# Altium footprint library 固定柱.PcbLib: 140 footprints (part 5 of 9)
Each footprint in its own frame and in the unit in brackets; x right, y up, seen from the top. Pads: shape width x height; smd on the part's side, far side on the other; paste and mask are expansions set on the pad; w line width, h text height; cw(c..) or ccw(c..) is an arc to the next point about the centre after c.
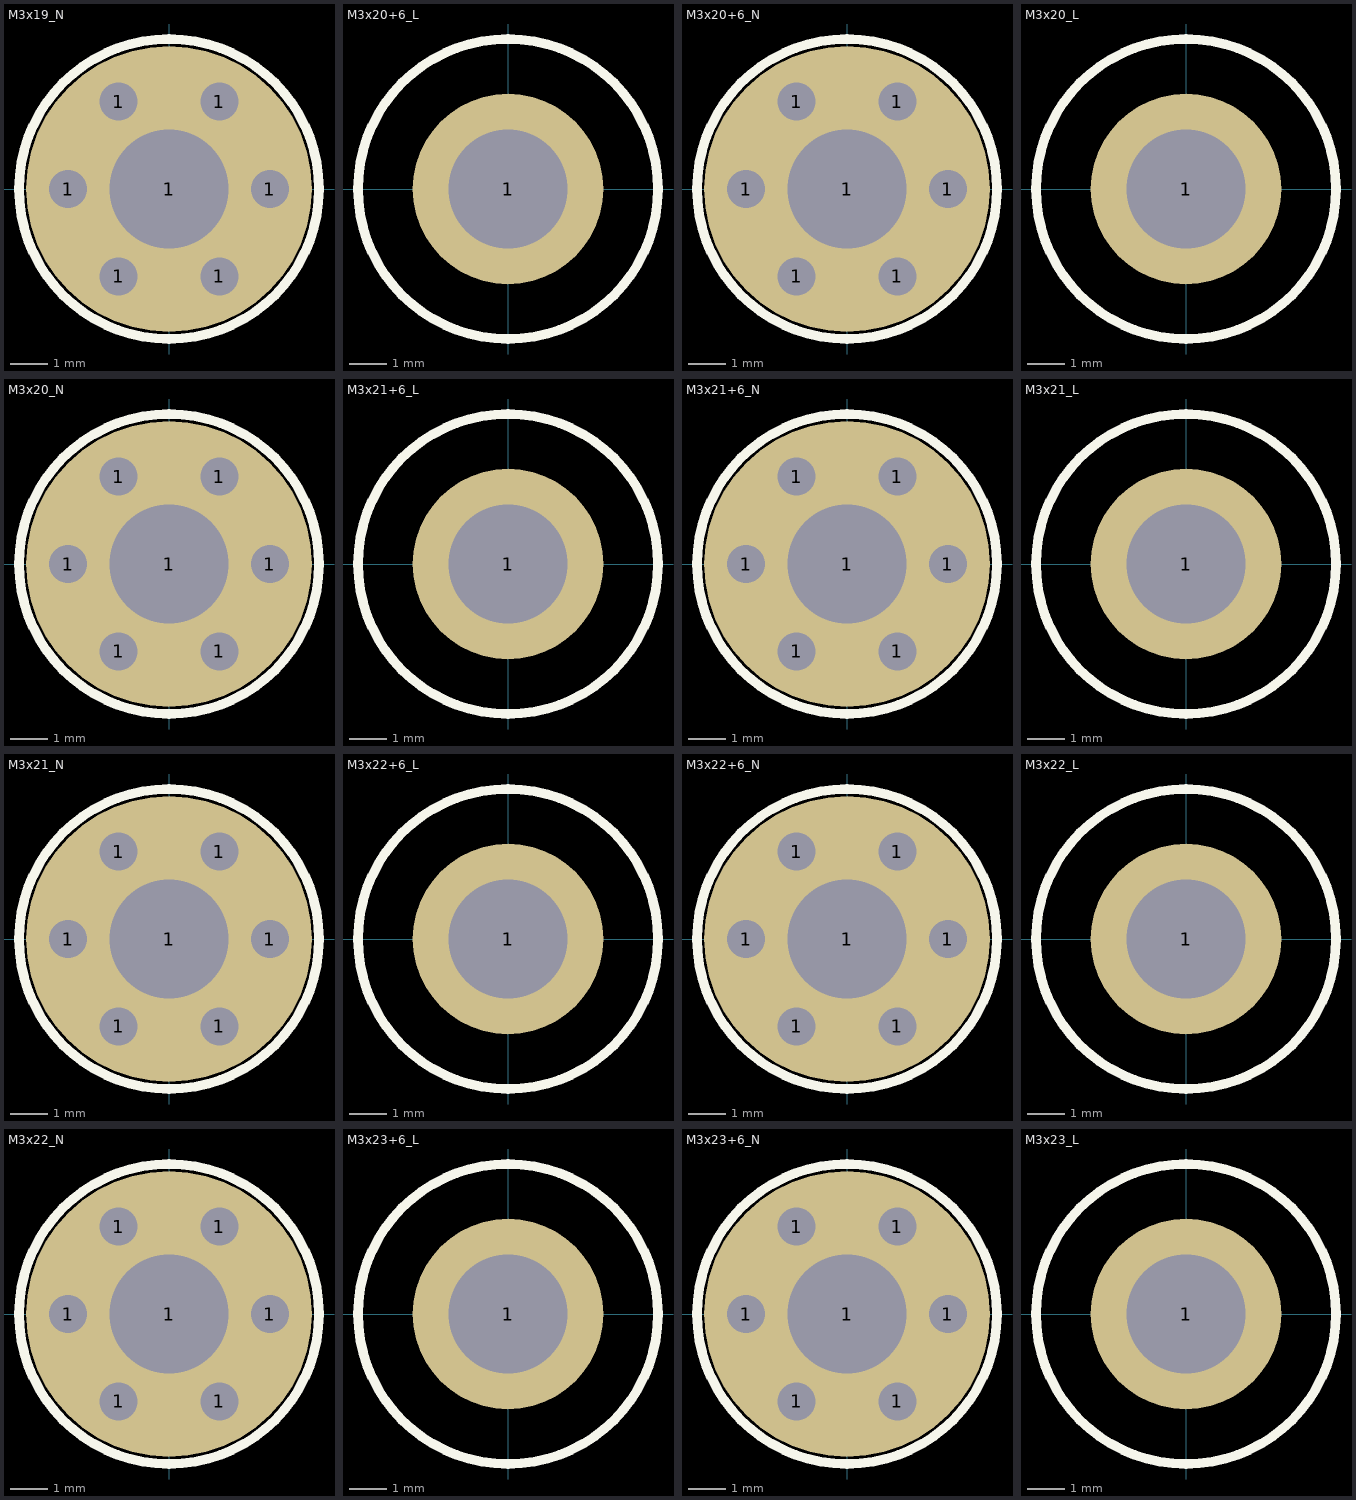
[diagram p4: the footprints below, top view; thin cyan lines are the x and y axes]

## M3x19_N [mil] "M3铜柱，长：19mm"
pads (7):
  round 40 hole 40: 1(-106,0) 1(-53,-91.8) 1(-53,91.8) 1(53,-91.8) 1(53,91.8) 1(106,0)
  round 300 hole 125: 1(0,0)
Top Overlay:
  circle w10: c0,0 r157.48
3D body "M3x19.STEP": height 750.01, standoff 1.96, extent -106.22,-92.52 106.22,92.52

## M3x20+6_L [mil] "M3铜柱，长：20mm，螺纹长：6mm"
pads (1):
  round 200 hole 125: 1(0,0)
Top Overlay:
  circle w10: c0,0 r157.48
3D body "M3x20+6.STEP": height 789.38, standoff -234.25, extent -106.22,-92.52 106.22,92.52

## M3x20+6_N [mil] "M3铜柱，长：20mm，螺纹长：6mm"
pads (7):
  round 40 hole 40: 1(-106,0) 1(-53,-91.8) 1(-53,91.8) 1(53,-91.8) 1(53,91.8) 1(106,0)
  round 300 hole 125: 1(0,0)
Top Overlay:
  circle w10: c0,0 r157.48
3D body "M3x20+6.STEP": height 789.38, standoff -234.25, extent -106.22,-92.52 106.22,92.52

## M3x20_L [mil] "M3铜柱，长：20mm"
pads (1):
  round 200 hole 125: 1(0,0)
Top Overlay:
  circle w10: c0,0 r157.48
3D body "M3x20.STEP": height 789.38, standoff 1.96, extent -106.22,-92.52 106.22,92.52

## M3x20_N [mil] "M3铜柱，长：20mm"
pads (7):
  round 40 hole 40: 1(-106,0) 1(-53,-91.8) 1(-53,91.8) 1(53,-91.8) 1(53,91.8) 1(106,0)
  round 300 hole 125: 1(0,0)
Top Overlay:
  circle w10: c0,0 r157.48
3D body "M3x20.STEP": height 789.38, standoff 1.96, extent -106.22,-92.52 106.22,92.52

## M3x21+6_L [mil] "M3铜柱，长：21mm，螺纹长：6mm"
pads (1):
  round 200 hole 125: 1(0,0)
Top Overlay:
  circle w10: c0,0 r157.48
3D body "M3x21+6.STEP": height 828.75, standoff -234.25, extent -106.22,-92.52 106.22,92.52

## M3x21+6_N [mil] "M3铜柱，长：21mm，螺纹长：6mm"
pads (7):
  round 40 hole 40: 1(-106,0) 1(-53,-91.8) 1(-53,91.8) 1(53,-91.8) 1(53,91.8) 1(106,0)
  round 300 hole 125: 1(0,0)
Top Overlay:
  circle w10: c0,0 r157.48
3D body "M3x21+6.STEP": height 828.75, standoff -234.25, extent -106.22,-92.52 106.22,92.52

## M3x21_L [mil] "M3铜柱，长：21mm"
pads (1):
  round 200 hole 125: 1(0,0)
Top Overlay:
  circle w10: c0,0 r157.48
3D body "M3x21.STEP": height 828.75, standoff 1.96, extent -106.22,-92.52 106.22,92.52

## M3x21_N [mil] "M3铜柱，长：21mm"
pads (7):
  round 40 hole 40: 1(-106,0) 1(-53,-91.8) 1(-53,91.8) 1(53,-91.8) 1(53,91.8) 1(106,0)
  round 300 hole 125: 1(0,0)
Top Overlay:
  circle w10: c0,0 r157.48
3D body "M3x21.STEP": height 828.75, standoff 1.96, extent -106.22,-92.52 106.22,92.52

## M3x22+6_L [mil] "M3铜柱，长：22mm，螺纹长：6mm"
pads (1):
  round 200 hole 125: 1(0,0)
Top Overlay:
  circle w10: c0,0 r157.48
3D body "M3x22+6.STEP": height 868.12, standoff -234.25, extent -106.22,-92.52 106.22,92.52

## M3x22+6_N [mil] "M3铜柱，长：22mm，螺纹长：6mm"
pads (7):
  round 40 hole 40: 1(-106,0) 1(-53,-91.8) 1(-53,91.8) 1(53,-91.8) 1(53,91.8) 1(106,0)
  round 300 hole 125: 1(0,0)
Top Overlay:
  circle w10: c0,0 r157.48
3D body "M3x22+6.STEP": height 868.12, standoff -234.25, extent -106.22,-92.52 106.22,92.52

## M3x22_L [mil] "M3铜柱，长：22mm"
pads (1):
  round 200 hole 125: 1(0,0)
Top Overlay:
  circle w10: c0,0 r157.48
3D body "M3x22.STEP": height 868.12, standoff 1.96, extent -106.22,-92.52 106.22,92.52

## M3x22_N [mil] "M3铜柱，长：22mm"
pads (7):
  round 40 hole 40: 1(-106,0) 1(-53,-91.8) 1(-53,91.8) 1(53,-91.8) 1(53,91.8) 1(106,0)
  round 300 hole 125: 1(0,0)
Top Overlay:
  circle w10: c0,0 r157.48
3D body "M3x22.STEP": height 868.12, standoff 1.96, extent -106.22,-92.52 106.22,92.52

## M3x23+6_L [mil] "M3铜柱，长：23mm，螺纹长：6mm"
pads (1):
  round 200 hole 125: 1(0,0)
Top Overlay:
  circle w10: c0,0 r157.48
3D body "M3x23+6.STEP": height 907.49, standoff -234.25, extent -106.22,-92.52 106.22,92.52

## M3x23+6_N [mil] "M3铜柱，长：23mm，螺纹长：6mm"
pads (7):
  round 40 hole 40: 1(-106,0) 1(-53,-91.8) 1(-53,91.8) 1(53,-91.8) 1(53,91.8) 1(106,0)
  round 300 hole 125: 1(0,0)
Top Overlay:
  circle w10: c0,0 r157.48
3D body "M3x23+6.STEP": height 907.49, standoff -234.25, extent -106.22,-92.52 106.22,92.52

## M3x23_L [mil] "M3铜柱，长：23mm"
pads (1):
  round 200 hole 125: 1(0,0)
Top Overlay:
  circle w10: c0,0 r157.48
3D body "M3x23.STEP": height 907.49, standoff 1.96, extent -106.22,-92.52 106.22,92.52